# Altium schematic symbol library Passive.SchLib: 20 symbols
Pins are listed as number, name and electrical type; pins without a type are passive.

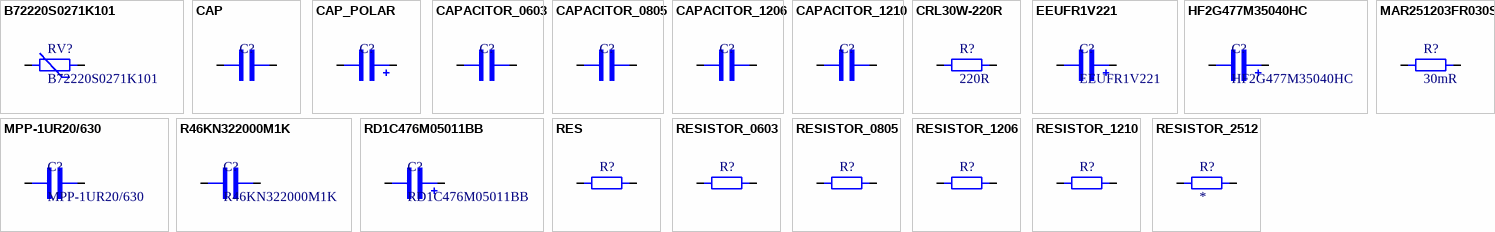
[diagram p0: symbols B72220S0271K101 to RESISTOR_2512]

## B72220S0271K101
designator RV?
Varistor: metal-oxide; THT; 275VAC; 350VDC; 430V; 8000A; Ø22.5mm
footprint B72220S0271K101
pins: 1, 2

## CAP
designator C?
Generic capacitor
pins: 1, 2

## CAP_POLAR
designator C?
Generic polarised capacitor
pins: 1, 2

## CAPACITOR_0603
designator C?
MLCC capacitor in 0603 package
footprint CAPACITOR_0603 (MLCC capacitor in 0603 package)
pins: 1, 2

## CAPACITOR_0805
designator C?
MLCC capacitor in 0805 package
footprint Capacitor_0805 (MLCC capacitor in 0805 package)
pins: 1, 2

## CAPACITOR_1206
designator C?
MLCC capacitor in 1206 package
footprint CAPACITOR_1206 (MLCC capacitor in 1206 package)
pins: 1, 2

## CAPACITOR_1210
designator C?
MLCC capacitor in 1210 package
footprint CAPACITOR_1210 (MLCC capacitor in 1210 package)
pins: 1, 2

## CRL30W-220R
designator R?, comment 220R
30W 220Ω cement resistor; Manufacturer: SR PASSIVES; Tolerance: 5%; Power: 30W; Value: 220R
footprint CRL30W-220R (30W 220? cement resistor)
pins: 1, 2

## EEUFR1V221
designator C?
Capacitor: electrolytic; low ESR; THT; 220uF; 35VDC; Ø8x11.5mm
footprint EEUFR1V221 (Capacitor: electrolytic; low ESR; THT; 220uF; 35VDC; O8x11.5mm)
pins: 1, 2

## HF2G477M35040HC
designator C?
Capacitor: electrolytic; SNAP-IN; 470uF; 400VDC; Ø35x40mm; ±20%
footprint HF2G477M35040HC (Capacitor: electrolytic; SNAP-IN; 470uF; 400VDC; O35x40mm; ±20%)
pins: 1, 2

## MAR251203FR030S
designator R?, comment 30mR
Resistor: thick film; 30mΩ; sensing; SMD; 2512; 3W; ±1%; -55÷170°C; Manufacturer: Wayon; Value: 30mR; ComponentLink1Description: TME; ComponentLink1URL: https://www.tme.eu/pl/details/mar251203fr010s/rezystory-smd/wayon/; Power: 3W; Tolerance: 1%
footprint MAR251203FR030S (Thick film 30m? 3W shunt resistor in 2512 package)
pins: 1, 2

## MPP-1UR20/630
designator C?
Capacitor: polypropylene; 1uF; 630VDC; 22x23.7x15.7mm; THT; ±10%
footprint MPP-1UR20/630 (Capacitor: polypropylene; 1uF; 630VDC; 22x23.7x15.7mm; THT; ±10%)
pins: 1, 2

## R46KN322000M1K
designator C?
Capacitor: polypropylene; X2; R46; 220nF; 560VDC; 275VAC; THT; ±10%
footprint R46KN322000M1K (Capacitor: polypropylene; X2; R46; 220nF; 560VDC; 275VAC; THT; ±10%)
pins: 1, 2

## RD1C476M05011BB
designator C?
Capacitor: electrolytic; THT; 47uF; 16VDC; Ø5x11mm; Pitch: 2mm; ±20%
footprint RD1C476M05011BB (Capacitor: electrolytic; THT; 47uF; 16VDC; O5x11mm; Pitch: 2mm; ±20%)
pins: 1, 2

## RES
designator R?
Generic resistor
pins: 1, 2

## RESISTOR_0603
designator R?
SMD resistor in 0603 package
footprint RESISTOR_0603 (SMD resistor in 0603 package)
pins: 1, 2

## RESISTOR_0805
designator R?
SMD resistor in 0805 package
footprint RESISTOR_0805 (SMD resistor in 0805 package)
pins: 1, 2

## RESISTOR_1206
designator R?
SMD resistor in 1206 package
footprint RESISTOR_1206 (SMD resistor in 1206 package)
pins: 1, 2

## RESISTOR_1210
designator R?
SMD resistor in 1210 package
footprint RESISTOR_1210 (SMD resistor in 1210 package)
pins: 1, 2

## RESISTOR_2512
designator R?
SMD resistor in 2512 package; Value: *
footprint RESISTOR_2512 (SMD resistor in 2512 package)
pins: 1, 2